# Altium schematic symbol library Schlib1.SchLib: 9 symbols
Pins are listed as number, name and electrical type; pins without a type are passive.

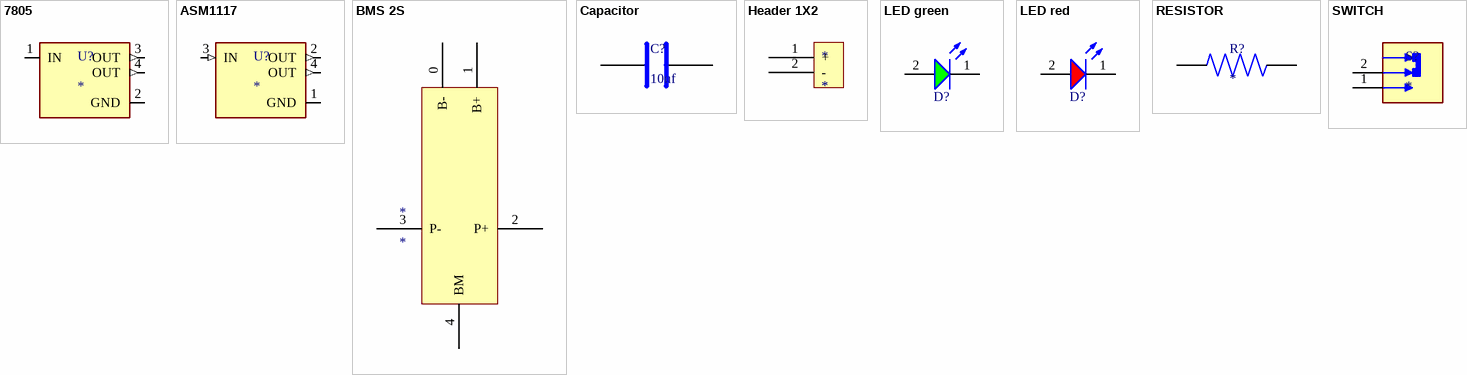
[diagram p0: symbols 7805 to SWITCH]

## 7805
designator U?
Linear Voltage Regulator IC 1 Output 1A SOT-223; MP: AZ1117EH-5.0TRG1; MF: Diodes Inc.; Package: SOT-223 Diodes Inc.; Digi-Key_Part_Number: AZ1117EH-5.0TRG1DICT-ND; SnapEDA_Link: https://www.snapeda.com/parts/AZ1117EH-5.0TRG1/Diodes%20Inc./view-part/795858/?ref=snap; Purchase-URL: https://pricing.snapeda.com/search/part/AZ1117EH-5.0TRG1/?ref=eda; Check_prices: https://www.snapeda.com/parts/AZ1117EH-5.0TRG1/Diodes%20Inc./view-part/795858/?ref=eda; Value: *
footprint 7805
pins: 1 IN (power), 2 GND (power), 3 OUT (out), 4 OUT (out)

## ASM1117 
designator U?
Linear Voltage Regulator IC 1 Output 1A SOT-223; MP: AZ1117EH-5.0TRG1; MF: Diodes Inc.; Package: SOT-223 Diodes Inc.; Digi-Key_Part_Number: AZ1117EH-5.0TRG1DICT-ND; SnapEDA_Link: https://www.snapeda.com/parts/AZ1117EH-5.0TRG1/Diodes%20Inc./view-part/795858/?ref=snap; Purchase-URL: https://pricing.snapeda.com/search/part/AZ1117EH-5.0TRG1/?ref=eda; Check_prices: https://www.snapeda.com/parts/AZ1117EH-5.0TRG1/Diodes%20Inc./view-part/795858/?ref=eda; Value: *
footprint 7805
pins: 1 GND (power), 2 OUT (out), 3 IN (in), 4 OUT (out)

## BMS 2S
designator *
footprint BMS 2S
pins: 0 B-, 1 B+, 2 P+, 3 P-, 4 BM

## Capacitor
designator C?, comment 10uf
pins: 11, 12   

## Header 1X2
designator *
footprint Header 1X2
pins: 1 +, 2 -

## LED green
designator D?, comment Bright Green, 2V, 140°  (value not drawn)
WL-SMCD Mono-color Chip LED Diffused, SMT, size 0603, Bright Green, 2V, 140°; Manufacturer Part Number: 150060VS55040; Manufacturer: Wurth Elektronik; Case/Size Code: 0603; Chip Technology: AlInGaP; Dominant Wavelength: 573nm; Luminous Intensity: 60mcd; Peak Wavelength: 575nm; Category: Signal LEDs; Match Code: WL-SMCD; ComponentLink1Description: Website Link; ComponentLink1URL: https://www.we-online.com/redexpert/article/150060VS55040?ad; ComponentLink2Description: Datasheet Link; ComponentLink2URL: https://www.we-online.com/redexpert/spec/150060VS55040?ad; Mount: Surface Mount; Operating Temperature Max: 85°C; Operating Temperature Min: -40°C; Packaging: Tape and Reel; Length: 1.6mm; Width: 0.8mm; Height: 0.4mm; Emitting Color: Bright Green; Forward Voltage: 2V; Viewing Angle: 140°
footprint WL-SMCD_0603
simulation model 0603_150060VS55040
pins: 1 K, 2 A

## LED red
designator D?, comment Super Red, 2V, 140°  (value not drawn)
WL-SMCD Mono-color Chip LED Diffused, SMT, size 0603, Super Red, 2V, 140°; Manufacturer Part Number: 150060SS55040; Manufacturer: Wurth Elektronik; Case/Size Code: 0603; Chip Technology: AlInGaP; Dominant Wavelength: 630nm; Luminous Intensity: 70mcd; Peak Wavelength: 645nm; Category: Signal LEDs; Match Code: WL-SMCD; ComponentLink1Description: Website Link; ComponentLink1URL: https://www.we-online.com/redexpert/article/150060SS55040?ad; ComponentLink2Description: Datasheet Link; ComponentLink2URL: https://www.we-online.com/redexpert/spec/150060SS55040?ad; Mount: Surface Mount; Operating Temperature Max: 85°C; Operating Temperature Min: -40°C; Packaging: Tape and Reel; Length: 1.6mm; Width: 0.8mm; Height: 0.4mm; Emitting Color: Super Red; Forward Voltage: 2V; Viewing Angle: 140°
footprint WL-SMCD_0603
simulation model 0603_150060SS55040
pins: 1 K, 2 A

## RESISTOR
designator R?
RES SMD 270 OHM 5% 0.4W 0805; MP: ESR10EZPJ271; Package: None; Price: None; Value: *; Availability: Unavailable
footprint RESISTOR
pins: 1, 2

## SWITCH
designator S?
Slide Switch SPST Through Hole; MF: C&K; MP: S101031MS02Q; SnapEDA_Link: https://www.snapeda.com/parts/S101031MS02Q/C%2526K/view-part/?ref=snap; Purchase-URL: https://pricing.snapeda.com/search/part/S101031MS02Q/?ref=eda; Package: None; Price: None; Availability: In Stock; Value: *; Check_prices: https://www.snapeda.com/parts/S101031MS02Q/C%2526K/view-part/?ref=eda
footprint SWITCH
pins: 1, 2